# Altium schematic symbol library 1N4148WX-TP.SchLib: 1 symbol
Pins are listed as number, name and electrical type; pins without a type are passive.

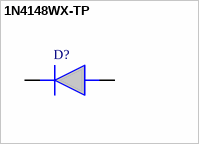
[diagram p0: symbol 1N4148WX-TP]

## 1N4148WX-TP
designator D?
MICRO COMMERCIAL COMPONENTS - 1N4148WX-TP - SWITCHING DIODE, 500MW, 1V, SOD323; Manufacturer_Name: Micro Commercial Components (MCC); Geometry.Height: 1.15mm; Mouser Part Number: 833-1N4148WX-TP; Mouser Price/Stock: https://www.mouser.co.uk/ProductDetail/Micro-Commercial-Components-MCC/1N4148WX-TP?qs=Vo7e0yZOYdH7fKyVBspYOg%3D%3D; Manufacturer_Part_Number: 1N4148WX-TP; Datasheet Link: https://componentsearchengine.com/Datasheets/2/1N4148WX-TP.pdf
footprint SOD2512X115N
pins: 1 K, 2 A